# Altium footprint library Switch$.PcbLib: 117 footprints (part 4 of 8)
Each footprint in its own frame and in the unit in brackets; x right, y up, seen from the top. Pads: shape width x height; smd on the part's side, far side on the other; paste and mask are expansions set on the pad; w line width, h text height; cw(c..) or ccw(c..) is an arc to the next point about the centre after c.
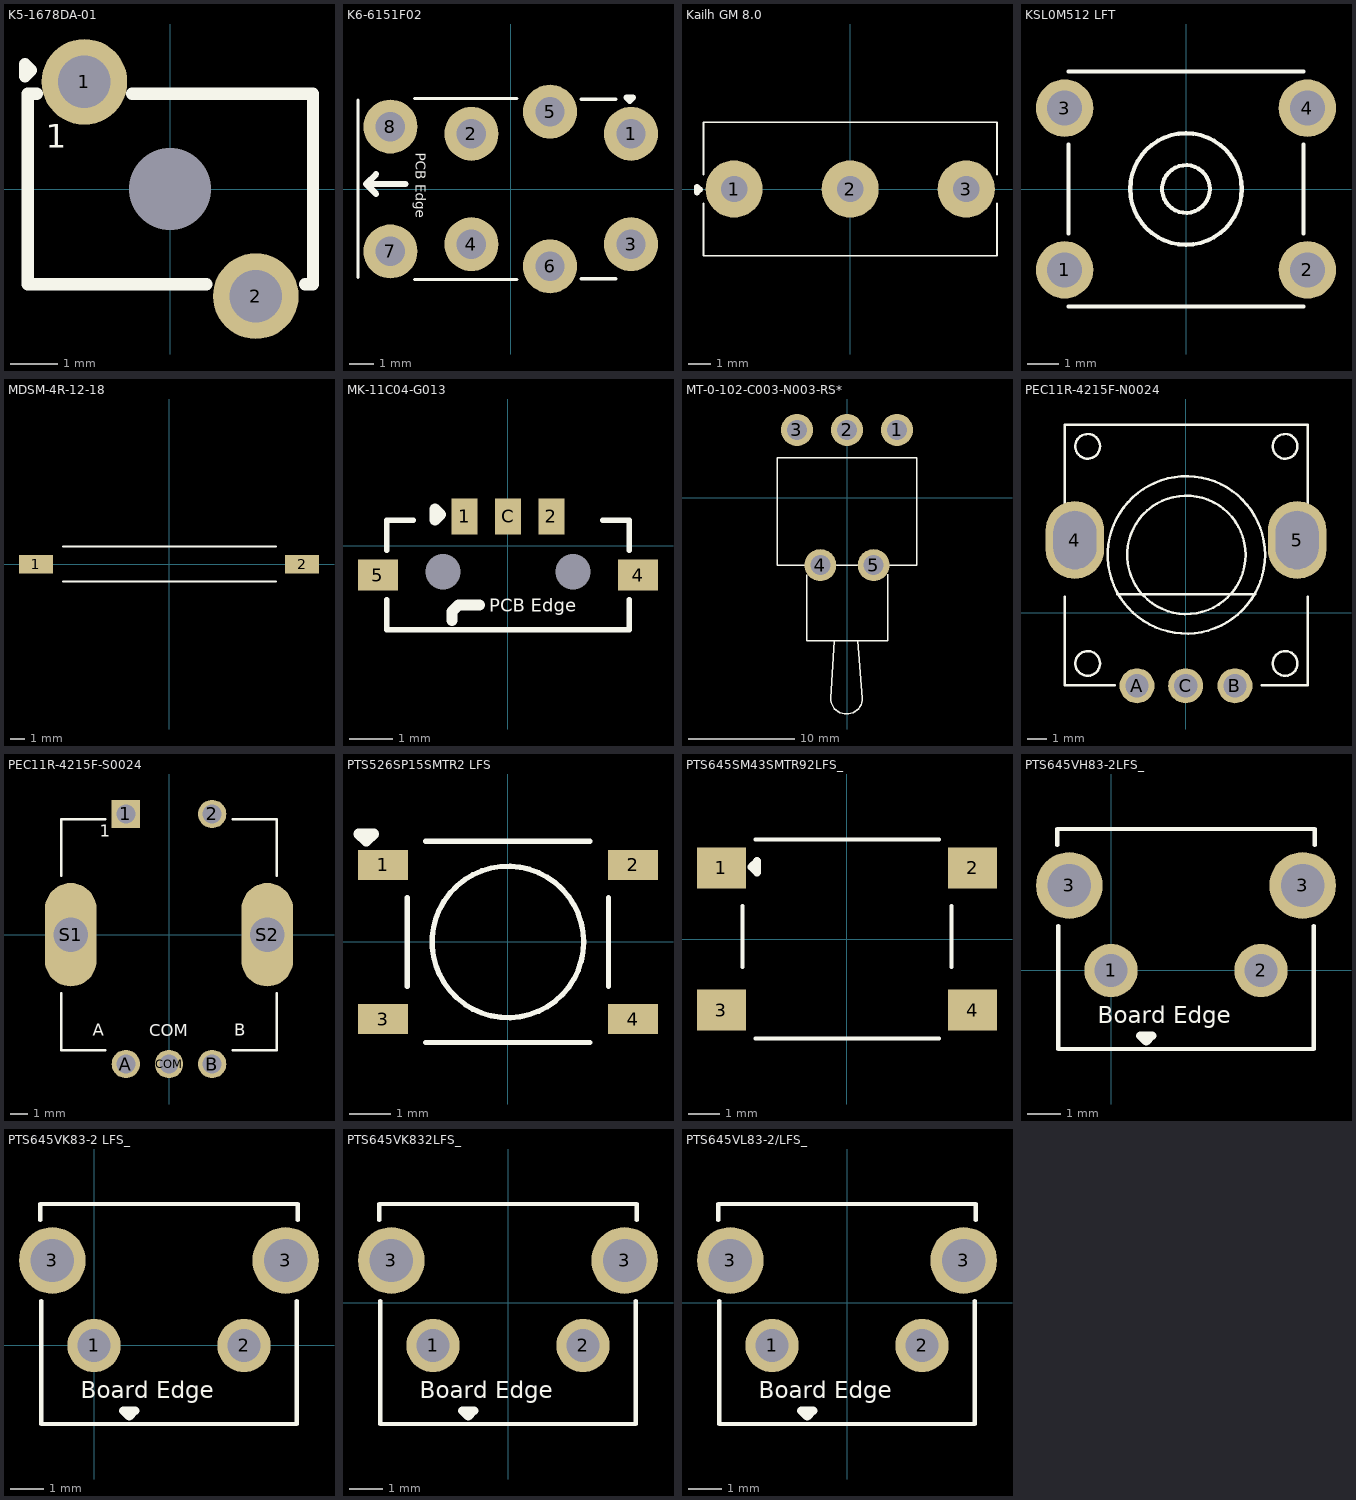
[diagram p3: the footprints below, top view; thin cyan lines are the x and y axes]

## K5-1678DA-01 [mm]
pads (3):
  round 1.8 hole 1.1: 1(-1.8,2.25) 2(1.8,-2.25)
  round 0 hole 1.72 unplated: MH(0,0)
Top Overlay:
  lines w0.254: -2.8,2 -2.99,2 -2.99,-2 0.769,-2 ; -0.8,2 3,2 3,-2 2.831,-2 ; -3.046,2.367 -3.046,2.621 -2.919,2.494 -3.046,2.367
  text "1" at -2.616,0.864 h0.5
3D body "K5-1678DA-01-1.STEP": height 8.7, standoff -2.7, extent -2.985,-2.275 3.015,2.325

## K6-6151F02 [mm]
pads (8):
  round 2.2 hole 1.2: 1(4.9,2.25) 2(-1.6,2.25) 3(4.9,-2.25) 4(-1.6,-2.25) 5(1.6,3.15) 6(1.6,-3.15) 7(-4.9,-2.54) 8(-4.9,2.54)
Top Overlay:
  lines w0.127: -6.223,-3.607 -6.223,3.632 ; -3.912,-3.683 0.254,-3.683 ; -3.912,3.683 0.254,3.683 ; 2.87,-3.658 4.293,-3.658 ; 2.87,3.658 4.293,3.658
  lines w0.254: -5.486,-0.203 -5.893,0.203 ; -5.486,0.61 -5.893,0.203 ; -4.293,0.203 -5.893,0.203 ; 4.721,3.725 4.975,3.725 4.848,3.598 4.721,3.725
  text "PCB Edge" at -3.88,1.473 h0.4
3D body "K6-6151F02 (3).STEP": height 7.2, standoff -3.1, extent -7.29,-3.675 5.149,3.625

## Kailh GM 8.0 [mm]
pads (3):
  round 2.5 hole 1.15: 1(-5.08,0) 2(0,0) 3(5.08,0)
Top Overlay:
  lines w0.076: -6.426,-0.619 -6.426,-2.921 6.426,-2.921 6.426,-0.619 ; -6.426,0.619 -6.426,2.921 6.426,2.921 6.426,0.619
  lines w0.254: -6.706,-0.152 -6.706,0.102 -6.579,-0.025 -6.706,-0.152
3D body "kalih switch.STEP": height 7.1, standoff -3.07, extent -6.4,-2.9 6.4,2.9

## KSL0M512 LFT [mm]
pads (4):
  round 1.8 hole 1.1: 1(-3.81,-2.54) 2(3.81,-2.54) 3(-3.81,2.54) 4(3.81,2.54)
Top Overlay:
  circle w0.127: c0,0 r1.75
  circle w0.127: c0,0 r0.749
  lines w0.127: -3.683,-3.683 3.683,-3.683 ; -3.683,-1.397 -3.683,1.397 ; -3.683,3.683 3.683,3.683 ; 3.683,-1.397 3.683,1.397
3D body "KSL0M512 LFT.STEP": height 10.1, standoff -4, extent -4.468,-3.9 4.494,3.9

## MDSM-4R-12-18 [mm]
pads (2):
  rect 2.34x1.3 smd: 1(-9.17,0) 2(9.17,0)
Top Overlay:
  lines w0.127: -7.315,-1.194 7.366,-1.194 ; -7.315,1.219 7.366,1.219
3D body "MDSM-4R-12-18.stp": height 2.54, standoff 0.01, extent -9.65,-1.118 9.65,1.155

## MK-11C04-G013 [mm]
pads (7):
  rect 0.6x0.83 smd: 1(-1,0.678) 2(1,0.678) C(0,0.678)
  rect 0.92x0.72 smd: 4(3,-0.677) 5(-3,-0.677)
  round 0 hole 0.81 unplated: MH(-1.5,-0.602) MH(1.5,-0.602)
Top Overlay:
  lines w0.127: -2.794,-1.253 -2.794,-1.939 2.184,-1.939 2.794,-1.939 2.794,-1.253 ; -2.794,-0.102 -2.794,0.584 -2.184,0.584 ; 2.184,0.584 2.794,0.584 2.794,-0.102
  lines w0.254: -1.295,-1.727 -1.295,-1.524 -1.143,-1.372 -0.66,-1.372 ; -1.679,0.593 -1.552,0.72 -1.679,0.847 -1.679,0.593
  text "PCB Edge" at -0.433,-1.527 h0.3
3D body "slide_switch_MK-11C04-G013+.step": height 0.7, standoff -0.5, extent -3.25,-3.06 3.25,0.64

## MT-0-102-C003-N003-RS* [mm]
pads (5):
  round 3 hole 1.9: 1(4.7,6.35) 2(0,6.35) 3(-4.7,6.35) 4(-2.5,-6.35) 5(2.5,-6.35)
Top Overlay:
  lines w0.127: -3.806,-7.24 -3.806,-13.45 3.81,-13.45 3.81,-7.233 ; -1.186,-13.45 -1.547,-18.85 ccw(c-0.047,-18.844) 1.454,-18.85 1.015,-13.45 ; -6.55,-6.35 -6.55,3.75 6.55,3.75 6.55,-6.35 -6.55,-6.35
3D body "C1788495.step": height 8.1, standoff -3.7, extent -6.55,-20.604 6.55,6.946

## PCBComponent_1 [mm]

## PEC11R-4215F-N0024 [mm]
pads (5):
  oval 3x4 hole 2.2 slot 3 at 90 deg: 4(-5.72,3.75) 5(5.72,3.75)
  round 1.8 hole 1.2: A(-2.52,-3.75) B(2.52,-3.75) C(-0.02,-3.75)
Top Overlay:
  circle w0.127: c0.02,2.988 r4.05
  circle w0.127: c-5.06,8.576 r0.635
  circle w0.127: c5.1,8.576 r0.635
  circle w0.127: c-5.06,-2.6 r0.635
  circle w0.127: c5.1,-2.6 r0.635
  circle w0.127: c0.02,2.988 r3.048
  lines w0.127: -6.23,0.847 -6.23,-3.712 -3.658,-3.712 ; -6.23,5.129 -6.23,9.688 6.27,9.688 6.27,5.129 ; -3.536,0.956 3.576,0.956 ; 3.886,-3.712 6.27,-3.712 6.27,0.847
3D body "C143791.step": height 19.7, standoff -3.5, extent -6.8,-3.747 6.8,9.654

## PEC11R-4215F-S0024 [mm]
pads (7):
  rect 1.65x1.65 hole 1.1: 1(-2.5,7)
  round 1.65 hole 1.1: 2(2.5,7) A(-2.5,-7.5) B(2.5,-7.5) COM(0,-7.5)
  oval 3x6 hole 2 square: S1(-5.7,0) S2(5.7,0)
Top Overlay:
  lines w0.127: -6.25,-3.4 -6.25,-6.7 -3.7,-6.7 ; -6.25,3.4 -6.25,6.7 -3.7,6.7 ; 3.7,-6.7 6.25,-6.7 6.25,-3.4 ; 3.7,6.7 6.25,6.7 6.25,3.4
  text "1" at -4.013,5.461 h1.2
  text "COM" at -1.147,-6.133 h1.2
  text "A" at -4.428,-6.096 h1.2
  text "B" at 3.785,-6.096 h1.2
3D body "PEC11R-4215F-S0024.STEP": height 21.5, standoff -3.7, extent -6.927,-7.6 6.927,7.1

## PTS526SP15SMTR2 LFS [mm]
pads (4):
  rect 1.2x0.72 smd paste+0 mask+0.051: 1(-3,1.85) 2(3,1.85) 3(-3,-1.85) 4(3,-1.85)
Top Overlay:
  circle w0.127: c-0.002,0 r1.818
  lines w0.127: -2.415,-1.069 -2.415,1.069 ; -1.971,-2.413 1.968,-2.413 ; -1.971,2.413 1.968,2.413 ; 2.411,-1.069 2.411,1.069
  lines w0.254: -3.581,2.591 -3.404,2.413 -3.226,2.591 -3.581,2.591
3D body "PTS526SP15SMTR2LFS.stp": height 1.5, standoff -0.05, extent -3.2,-2.55 3.2,2.55

## PTS645SM43SMTR92LFS_ [mm] "SWITCH TACTILE SPST-NO 0.05A 12V"
pads (4):
  rect 1.55x1.3 smd: 1(-3.975,2.25) 2(3.975,2.25) 3(-3.975,-2.25) 4(3.975,-2.25)
Top Overlay:
  lines w0.127: -3.302,-0.889 -3.302,1.041 ; -2.896,-3.15 2.921,-3.15 ; -2.896,3.15 2.921,3.15 ; 3.302,-0.889 3.302,1.041
  lines w0.254: -3.023,2.286 -2.845,2.464 -2.845,2.108 -3.023,2.286
3D body "PTS645SR13SMTR92LFS.stp": height 13, standoff 0, extent -4.5,-3.1 4.5,3.1

## PTS645VH83-2LFS_ [mm]
pads (4):
  round 1.6 hole 1: 1(0,0) 2(4.5,0)
  round 2 hole 1.3: 3(-1.25,2.55) 3(5.75,2.55)
Top Overlay:
  lines w0.127: -1.611,3.764 -1.611,4.247 6.111,4.247 6.111,3.764 ; -1.585,1.336 -1.585,-2.357 6.085,-2.357 6.085,1.336 6.085,-1.9
  lines w0.254: 0.878,-1.951 1.234,-1.951 1.056,-2.129 0.878,-1.951
  text "Board Edge" at -0.392,-1.578 h0.51
3D body "PTS645VK83-2LFS.stp": height 7.5, standoff -3.85, extent -1.997,-8.304 6.497,4.196

## PTS645VK83-2 LFS_ [mm]
pads (4):
  round 1.6 hole 1: 1(0,0) 2(4.5,0)
  round 2 hole 1.3: 3(-1.25,2.55) 3(5.75,2.55)
Top Overlay:
  lines w0.127: -1.611,3.764 -1.611,4.247 6.111,4.247 6.111,3.764 ; -1.585,1.336 -1.585,-2.357 6.085,-2.357 6.085,1.336 6.085,-1.9
  lines w0.254: 0.878,-1.951 1.234,-1.951 1.056,-2.129 0.878,-1.951
  text "Board Edge" at -0.392,-1.578 h0.51
3D body "PTS645VK83-2LFS.stp": height 7.5, standoff -3.85, extent -1.997,-8.304 6.497,4.196

## PTS645VK832LFS_ [mm]
pads (4):
  round 1.6 hole 1: 1(-2.25,-1.275) 2(2.25,-1.275)
  round 2 hole 1.3: 3(-3.5,1.275) 3(3.5,1.275)
Top Overlay:
  lines w0.127: -3.861,2.489 -3.861,2.972 3.861,2.972 3.861,2.489 ; -3.835,0.061 -3.835,-3.632 3.835,-3.632 3.835,0.061 3.835,-3.175
  lines w0.254: -1.372,-3.226 -1.194,-3.404 -1.016,-3.226 -1.372,-3.226
  text "Board Edge" at -2.642,-2.853 h0.51
3D body "PTS645VK83-2LFS.stp": height 7.5, standoff -3.85, extent -4.247,-9.579 4.247,2.921

## PTS645VL83-2/LFS_ [mm]
pads (4):
  round 1.6 hole 1: 1(-2.25,-1.275) 2(2.25,-1.275)
  round 2 hole 1.3: 3(-3.5,1.275) 3(3.5,1.275)
Top Overlay:
  lines w0.127: -3.861,2.489 -3.861,2.972 3.861,2.972 3.861,2.489 ; -3.835,0.061 -3.835,-3.632 3.835,-3.632 3.835,0.061 3.835,-3.175
  lines w0.254: -1.372,-3.226 -1.016,-3.226 -1.194,-3.404 -1.372,-3.226
  text "Board Edge" at -2.642,-2.853 h0.51
3D body "PTS645VK83-2LFS.stp": height 7.5, standoff -3.85, extent -4.247,-9.579 4.247,2.921